# Altium schematic symbol library SMCJ36A.SchLib: 1 symbol
Pins are listed as number, name and electrical type; pins without a type are passive.

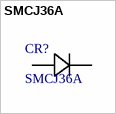
[diagram p0: symbol SMCJ36A]

## SMCJ36A
designator CR?
Description; Manufacturer_Name: Littelfuse Inc; Copyright: Copyright (C) 2026 Ultra Librarian. All rights reserved.; Manufacturer_Part_Number: SMCJ36A
footprint SMCJSeries_LTF
pins: 1, 2